# Altium footprint library standard-case.PcbLib: 206 footprints (part 3 of 13)
Each footprint in its own frame and in the unit in brackets; x right, y up, seen from the top. Pads: shape width x height; smd on the part's side, far side on the other; paste and mask are expansions set on the pad; w line width, h text height; cw(c..) or ccw(c..) is an arc to the next point about the centre after c.
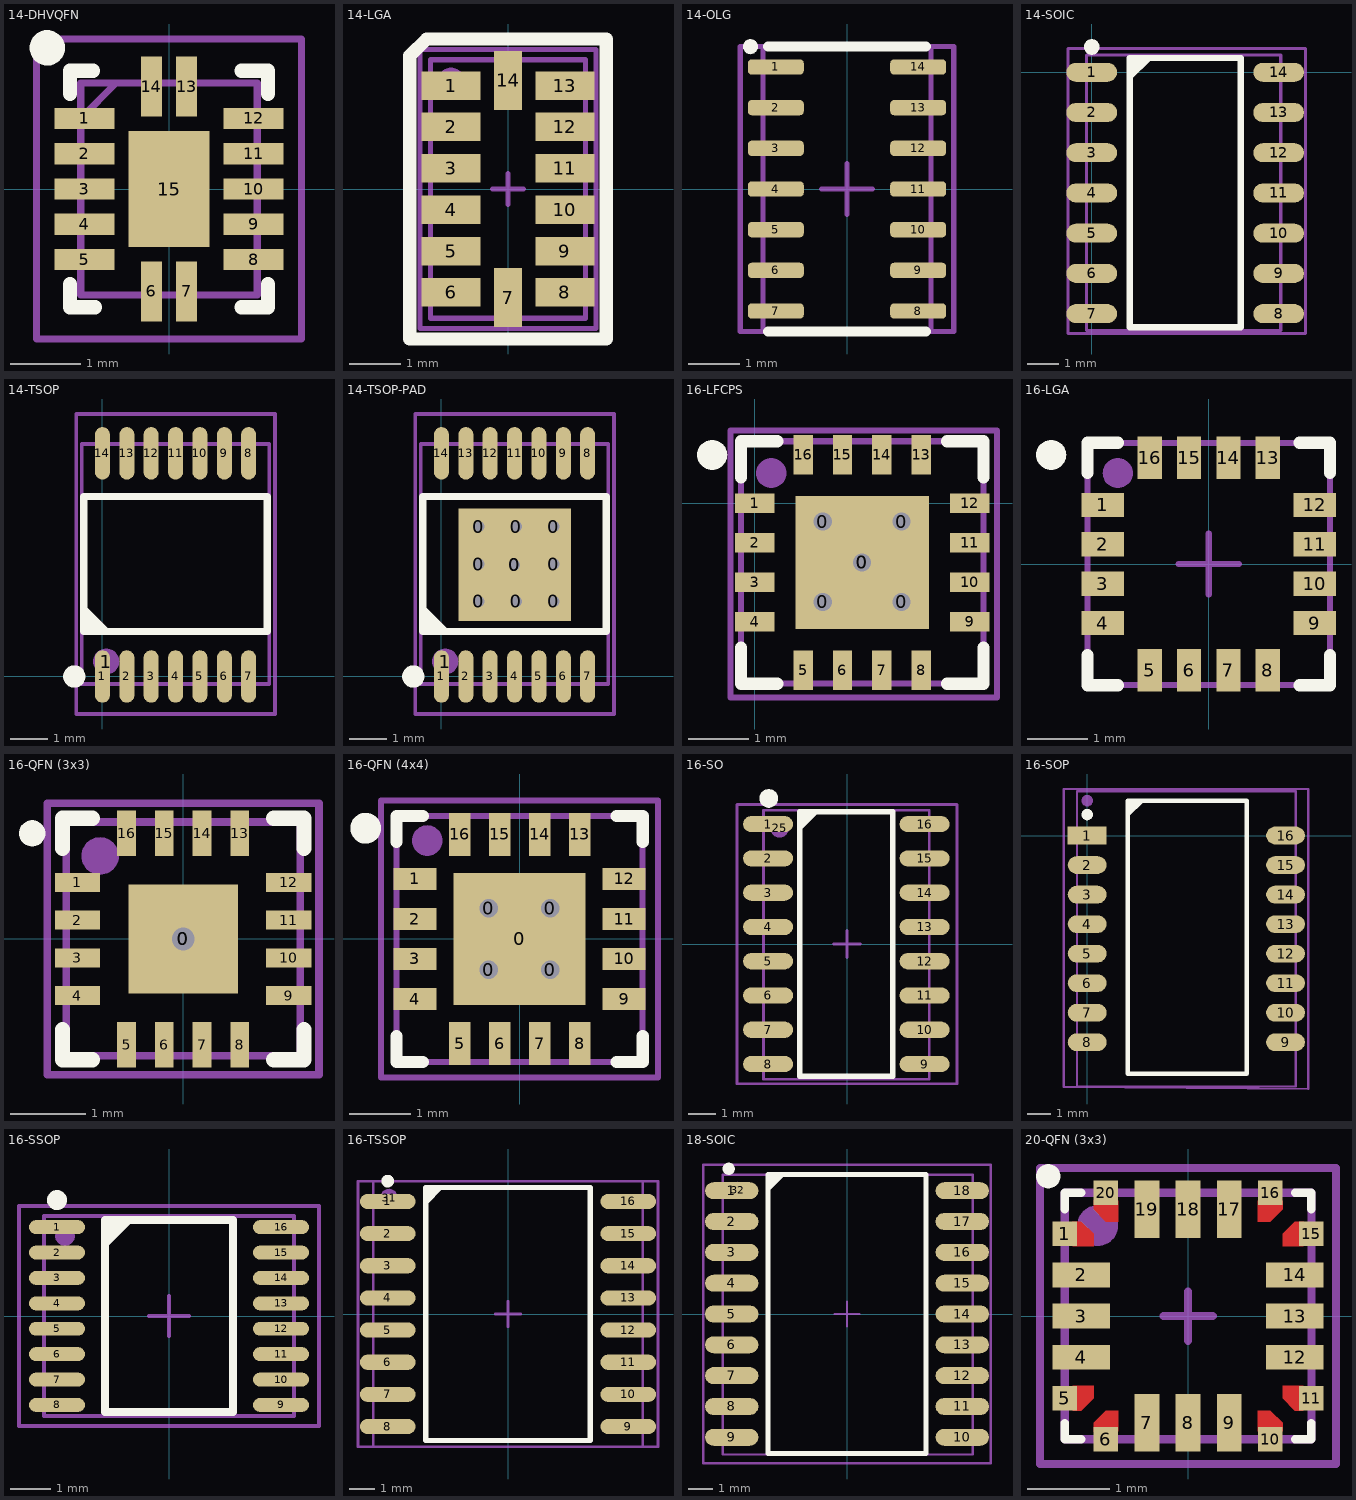
[diagram p2: the footprints below, top view; thin cyan lines are the x and y axes]

## 14-DHVQFN [mm]
pads (15):
  rect 0.85x0.3 smd: 1(-1.2,1) 2(-1.2,0.5) 3(-1.2,0) 4(-1.2,-0.5) 5(-1.2,-1) 8(1.2,-1) 9(1.2,-0.5) 10(1.2,0) 11(1.2,0.5) 12(1.2,1)
  rect 0.3x0.85 smd: 6(-0.25,-1.45) 7(0.25,-1.45) 13(0.25,1.45) 14(-0.25,1.45)
  rect 1.15x1.65 smd: 15(0,0)
Top Overlay:
  circle w0.25: c-1.725,2 r0.125
  lines w0.2: -1.4,-1.675 -1.4,-1.35 ; -1.4,1.35 -1.4,1.675 -1.075,1.675 ; -1.375,-1.675 -1.05,-1.675 ; 1.025,-1.675 1.35,-1.675 ; 1.025,1.675 1.35,1.675 ; 1.4,-1.675 1.4,-1.35 ; 1.4,1.35 1.4,1.675
Mechanical 13:
  lines w0.1: -1.25,1 -0.75,1.5 ; -1.25,-1.5 1.25,-1.5 1.25,1.5 -1.25,1.5 -1.25,-1.5
Mechanical 15:
  lines w0.1: -1.875,-2.125 1.875,-2.125 1.875,2.125 -1.875,2.125 -1.875,-2.125
3D body "74LVC125ABQ,115.stp": height 1, standoff 0, extent -1.3,-1.55 1.3,1.55

## 14-LGA [mm]
height 1
pads (15):
  rect 1.145x0.55 smd: 1(-1.1,2) 2(-1.1,1.2) 3(-1.1,0.4) 4(-1.1,-0.4) 5(-1.1,-1.2) 6(-1.1,-2) 8(1.1,-2) 9(1.1,-1.2) 10(1.1,-0.4) 11(1.1,0.4) 12(1.1,1.2) 13(1.1,2)
  rect 0.55x1.145 smd: 7(0,-2.1) 14(0,2.1)
  round 0.5 on Mech1: ""(-1.1,2.1)
Top Overlay:
  lines w0.254: -1.9,-2.9 1.9,-2.9 1.9,2.9 -1.575,2.9 -1.9,2.575 -1.9,-2.9
Mechanical 1:
  lines w0.1: -1.5,-2.5 1.5,-2.5 1.5,2.5 -1.5,2.5 -1.5,-2.5
Mechanical 15:
  lines w0.1: -0.3,0 0.3,0 ; 0,-0.3 0,0.3 ; -1.7,-2.7 -1.7,2.7 1.7,2.7 1.7,-2.7 -1.7,-2.7
3D body "SW3dPS-LGA-14.STEP": height 1.03, standoff -0.4, extent -1.49,-2.5 1.51,2.5

## 14-OLG [mm]
pads (15):
  rrect50% 1.1x0.3 smd: 1(-1.4,2.4) 2(-1.4,1.6) 3(-1.4,0.8) 4(-1.4,0) 5(-1.4,-0.8) 6(-1.4,-1.6) 7(-1.4,-2.4) 8(1.4,-2.4) 9(1.4,-1.6) 10(1.4,-0.8) 11(1.4,0) 12(1.4,0.8) 13(1.4,1.6) 14(1.4,2.4)
  round 0.3 on Top Overlay: ""(-1.9,2.8)
Top Overlay:
  lines w0.2: -1.55,-2.8 1.55,-2.8 ; -1.55,2.8 1.55,2.8
Mechanical 1:
  lines w0.1: -1.65,-2.8 1.65,-2.8 1.65,2.8 -1.65,2.8 -1.65,-2.8
Mechanical 15:
  lines w0.1: -0.5,0 0.5,0 ; 0,-0.5 0,0.5 ; -2.1,-2.8 2.1,-2.8 2.1,2.8 -2.1,2.8 -2.1,-2.8
3D body "User Library-MAX30101.STEP": height 1.52, standoff -0.03, extent -1.65,-2.8 1.65,2.8

## 14-SOIC [mm] "pitch 1.27 mm"
pads (16):
  rrect100% 1.6x0.6 smd: 1(0,0) 2(0,-1.27) 3(0,-2.54) 4(0,-3.81) 5(0,-5.08) 6(0,-6.35) 7(0,-7.62) 8(5.9,-7.62) 9(5.9,-6.35) 10(5.9,-5.08) 11(5.9,-3.81) 12(5.9,-2.54) 13(5.9,-1.27) 14(5.9,0)
  rrect100% 0.5x0.5 on Top Overlay: ""(0,0.8)
  round 0.5 on Mech1: ""(0.5,0)
Top Overlay:
  region: 1.2,0.45 1.2,-0.27 1.92,0.45
  lines w0.2: 1.2,-8.05 1.2,0.45 4.7,0.45 4.7,-8.05 1.2,-8.05
Mechanical 1:
  lines w0.1: -0.168,-8.15 5.969,-8.15 5.969,0.55 -0.168,0.55 -0.168,-8.15
Mechanical 15:
  lines w0.1: -0.75,-8.25 6.75,-8.25 6.75,0.5 6.75,0.75 -0.75,0.75 -0.75,-8.25
3D body "User Library-so14-2.STEP": height 1.78, standoff 0.01, extent -0.118,-8.15 6.019,0.55

## 14-TSOP [mm]
pads (16):
  rrect100% 0.4x1.4 smd: 1(0,0) 2(0.65,0) 3(1.3,0) 4(1.95,0) 5(2.6,0) 6(3.25,0) 7(3.9,0) 8(3.9,5.95) 9(3.25,5.95) 10(2.6,5.95) 11(1.95,5.95) 12(1.3,5.95) 13(0.65,5.95) 14(0,5.95)
  round 0.7 on Mech1: 1(0.1,0.4)
  round 0.6 on Top Overlay: ""(-0.75,0)
Top Overlay:
  region: -0.5,1.2 0.22,1.2 -0.5,1.92
  lines w0.2: -0.5,1.2 4.4,1.2 4.4,4.8 -0.5,4.8 -0.5,1.2
Mechanical 1:
  lines w0.1: -0.55,6.2 -0.55,6.2 ; -0.55,6.2 4.45,6.2 4.45,-0.2 -0.55,-0.2 -0.55,6.2
Mechanical 15:
  lines w0.1: -0.7,-1 -0.7,7 4.6,7 4.6,2.4 4.6,-1 -0.7,-1
3D body "SW3dPS-TSSOP14-1.STEP": height 1.1, standoff 0, extent -0.55,-0.2 4.45,6.2

## 14-TSOP-PAD [mm] "pitch 0.65 mm, power pad"
pads (26):
  round 0.7 hole 0.3: 0(1,2) 0(1,3) 0(1,4) 0(1.95,2.975) 0(2,2) 0(2,4) 0(3,2) 0(3,3) 0(3,4)
  rect 3x3 smd: 0(1.95,2.975)
  rrect100% 0.4x1.4 smd: 1(0,0) 2(0.65,0) 3(1.3,0) 4(1.95,0) 5(2.6,0) 6(3.25,0) 7(3.9,0) 8(3.9,5.95) 9(3.25,5.95) 10(2.6,5.95) 11(1.95,5.95) 12(1.3,5.95) 13(0.65,5.95) 14(0,5.95)
  round 0.7 on Mech1: 1(0.1,0.4)
  round 0.6 on Top Overlay: ""(-0.75,0)
Top Overlay:
  region: -0.5,1.2 0.22,1.2 -0.5,1.92
  lines w0.2: -0.5,1.2 4.4,1.2 4.4,4.8 -0.5,4.8 -0.5,1.2
Mechanical 1:
  lines w0.1: -0.55,6.2 -0.55,6.2 ; -0.55,6.2 4.45,6.2 4.45,-0.2 -0.55,-0.2 -0.55,6.2
Mechanical 15:
  lines w0.1: -0.7,-1 -0.7,7 4.6,7 4.6,2.4 4.6,-1 -0.7,-1
3D body "SW3dPS-TSSOP14-1.STEP": height 1.1, standoff 0, extent -0.55,-0.2 4.45,6.2

## 16-LFCPS [mm] "4x4 mm, pitch 0.65 mm"
height 0.9
pads (24):
  round 0.7 hole 0.3: 0(1.125,-1.625) 0(1.125,-0.3) 0(1.775,-0.975) 0(2.425,-1.625) 0(2.425,-0.3)
  rect 2.2x2.2 smd: 0(1.775,-0.975)
  rect 0.65x0.32 smd: 1(0,0) 2(0,-0.65) 3(0,-1.3) 4(0,-1.95) 9(3.55,-1.95) 10(3.55,-1.3) 11(3.55,-0.65) 12(3.55,0)
  rect 0.32x0.65 smd: 5(0.8,-2.75) 6(1.45,-2.75) 7(2.1,-2.75) 8(2.75,-2.75) 13(2.75,0.8) 14(2.1,0.8) 15(1.45,0.8) 16(0.8,0.8)
  round 0.5 on Top Overlay: ""(-0.7,0.8)
  round 0.5 on Mech1: ""(0.275,0.5)
Top Overlay:
  lines w0.2: -0.225,-2.375 -0.225,-2.975 0.375,-2.975 ; -0.225,0.425 -0.225,1.025 0.375,1.025 ; 3.175,-2.975 3.775,-2.975 3.775,-2.375 ; 3.175,1.025 3.775,1.025 3.775,0.425
Mechanical 1:
  lines w0.1: -0.225,-2.975 -0.225,1.025 3.775,1.025 3.775,-2.975 -0.225,-2.975
Mechanical 15:
  lines w0.1: -0.4,-3.2 4,-3.2 4,1.2 -0.4,1.2 -0.4,-3.2
3D body "User Library-qfn16-4x4No pad.STEP": height 0.92, standoff 0, extent -0.225,-2.975 3.775,1.025

## 16-LGA [mm] "4x4 mm, pitch 0.65 mm"
height 1
pads (18):
  rect 0.7x0.4 smd: 1(-1.75,0.975) 2(-1.75,0.325) 3(-1.75,-0.325) 4(-1.75,-0.975) 9(1.75,-0.975) 10(1.75,-0.325) 11(1.75,0.325) 12(1.75,0.975)
  rect 0.4x0.7 smd: 5(-0.975,-1.75) 6(-0.325,-1.75) 7(0.325,-1.75) 8(0.975,-1.75) 13(0.975,1.75) 14(0.325,1.75) 15(-0.325,1.75) 16(-0.975,1.75)
  round 0.5 on Top Overlay: ""(-2.6,1.8)
  round 0.5 on Mech1: ""(-1.5,1.5)
Top Overlay:
  lines w0.2: -2,-1.5 -2,-2 -1.5,-2 ; -2,1.5 -2,2 -1.5,2 ; 1.5,-2 2,-2 2,-1.5 ; 1.5,2 2,2 2,1.5
Mechanical 1:
  lines w0.1: -2,-2 -2,2 2,2 2,-2 -2,-2
Mechanical 15:
  lines w0.1: -0.5,0 0.5,0 ; 0,-0.5 0,0.5 ; -2,-2 -2,2 2,2 2,-2 -2,-2
3D body "User Library-LGA-16.step": height 0.98, standoff 0, extent -2,-2 2,2

## 16-QFN (3x3) [mm] "3x3 mm, pitch 0.5 mm"
height 0.75
pads (20):
  rect 1.45x1.45 smd: 0(0,0)
  round 0.7 hole 0.3: 0(0,0)
  rect 0.6x0.25 smd: 1(-1.4,0.75) 2(-1.4,0.25) 3(-1.4,-0.25) 4(-1.4,-0.75) 9(1.4,-0.75) 10(1.4,-0.25) 11(1.4,0.25) 12(1.4,0.75)
  rect 0.25x0.6 smd: 5(-0.75,-1.4) 6(-0.25,-1.4) 7(0.25,-1.4) 8(0.75,-1.4) 13(0.75,1.4) 14(0.25,1.4) 15(-0.25,1.4) 16(-0.75,1.4)
  round 0.35 on Top Overlay: ""(-2,1.4)
  round 0.5 on Mech1: ""(-1.1,1.1)
Top Overlay:
  lines w0.2: -1.6,-1.2 -1.6,-1.6 -1.2,-1.6 ; -1.6,1.2 -1.6,1.6 -1.2,1.6 ; 1.2,-1.6 1.6,-1.6 1.6,-1.2 ; 1.2,1.6 1.6,1.6 1.6,1.2
Mechanical 1:
  lines w0.1: -1.55,-1.55 -1.55,1.55 1.55,1.55 1.55,-1.55 -1.55,-1.55
Mechanical 15:
  lines w0.1: -0.2,0 0.2,0 ; 0,-0.2 0,0.2 ; -1.8,-1.8 1.8,-1.8 1.8,1.8 -1.8,1.8 -1.8,-1.8
3D body "User Library-QFN-16.STEP": height 0.9, standoff 0, extent -1.501,-1.501 1.501,1.501

## 16-QFN (4x4) [mm] "4x4 mm, pitch 0.65 mm"
height 0.75
pads (22):
  round 0.7 hole 0.3: 0(-0.5,-0.5) 0(-0.5,0.5) 0(0.5,-0.5) 0(0.5,0.5)
  rect 2.15x2.15 smd: 0(0,0)
  rect 0.7x0.35 smd: 1(-1.7,0.975) 2(-1.7,0.325) 3(-1.7,-0.325) 4(-1.7,-0.975) 9(1.7,-0.975) 10(1.7,-0.325) 11(1.7,0.325) 12(1.7,0.975)
  rect 0.35x0.7 smd: 5(-0.975,-1.7) 6(-0.325,-1.7) 7(0.325,-1.7) 8(0.975,-1.7) 13(0.975,1.7) 14(0.325,1.7) 15(-0.325,1.7) 16(-0.975,1.7)
  round 0.5 on Mech1: ""(-1.5,1.6)
Top Overlay:
  circle w0.25: c-2.5,1.8 r0.125
  lines w0.2: -2,-1.575 -2,-2 -1.575,-2 ; -2,1.575 -2,2 -1.575,2 ; 1.575,-2 2,-2 2,-1.575 ; 1.575,2 2,2 2,1.575
Mechanical 1:
  lines w0.1: -2,-2 -2,2 2,2 2,-2 -2,-2
Mechanical 15:
  lines w0.1: -0.5,0 0.5,0 ; 0,-0.5 0,0.5 ; -2.25,-2.25 -2.25,2.25 2.25,2.25 2.25,-2.25 -2.25,-2.25
3D body "16-QFN (4x4).step": height 0.75, standoff 0, extent -2,-2 2,2

## 16-SO [mm] "pitch 1.27 mm"
height 2.65
pads (18):
  oval 1.85x0.6 smd: 1(-2.925,4.448) 2(-2.925,3.178) 3(-2.925,1.908) 4(-2.925,0.638) 5(-2.925,-0.632) 6(-2.925,-1.902) 7(-2.925,-3.172) 8(-2.925,-4.442) 9(2.875,-4.442) 10(2.875,-3.172) 11(2.875,-1.902) 12(2.875,-0.632) 13(2.875,0.638) 14(2.875,1.908) 15(2.875,3.178) 16(2.875,4.448)
  round 0.7 on Mech1: 25(-2.5,4.3)
  round 0.7 on Top Overlay: ""(-2.9,5.4)
Top Overlay:
  region: -1.75,4.9 -1.75,4.18 -1.03,4.9
  lines w0.2: -1.75,-4.9 -1.75,4.9 1.7,4.9 1.7,-4.9 -1.75,-4.9
Mechanical 1:
  lines w0.1: -3.093,-5.01 -3.093,4.96 3.044,4.96 3.044,-5.01 -3.093,-5.01
Mechanical 15:
  lines w0.1: -0.499,0.003 0.501,0.003 ; 0.001,-0.497 0.001,0.503 ; -4.075,-5.175 -4.075,5.175 4.075,5.175 4.075,-5.175 -4.075,-5.175
3D body "User Library-so16-1.STEP": height 1.73, standoff -0.04, extent -3.093,-5.01 3.044,4.96

## 16-SOP [mm] "pitch 1.27 mm"
pads (18):
  rect 1.67x0.76 smd: 1(0,0)
  oval 1.67x0.76 smd: 2(0,-1.27) 3(0,-2.54) 4(0,-3.81) 5(0,-5.08) 6(0,-6.35) 7(0,-7.62) 8(0,-8.89) 9(8.53,-8.89) 10(8.53,-7.62) 11(8.53,-6.35) 12(8.53,-5.08) 13(8.53,-3.81) 14(8.53,-2.54) 15(8.53,-1.27) 16(8.53,0)
  round 0.5 on Top Overlay: ""(0,0.9)
  round 0.5 on Mech1: ""(0,1.5)
Top Overlay:
  region: 1.75,1.5 1.75,0.78 2.47,1.5
  lines w0.2: 4.583,1.5 6.86,1.5 6.86,-10.25 1.75,-10.25 1.75,1.5 6,1.5
Mechanical 1:
  lines w0.1: -0.435,-10.795 8.965,-10.795 8.965,1.905 -0.435,1.905 -0.435,-10.795
Mechanical 15:
  lines w0.1: -1,-10.8 9.5,-10.9 9.5,2 -1,2 -1,-10.8
3D body "User Library-smt4.step": height 5.1, standoff 0, extent -0.435,-10.795 8.965,1.905

## 16-SSOP [mm] "pitch 0.635 mm"
height 1.75
pads (17):
  oval 1.4x0.35 smd: 1(-2.8,2.222) 2(-2.8,1.587) 3(-2.8,0.953) 4(-2.8,0.318) 5(-2.8,-0.318) 6(-2.8,-0.953) 7(-2.8,-1.587) 8(-2.8,-2.222) 9(2.8,-2.222) 10(2.8,-1.587) 11(2.8,-0.953) 12(2.8,-0.318) 13(2.8,0.318) 14(2.8,0.953) 15(2.8,1.587) 16(2.8,2.222)
  round 0.5 on Mech1: ""(-2.6,2)
Top Overlay:
  circle w0.25: c-2.8,2.9 r0.125
  region: -1.6,2.4 -1.6,1.68 -0.88,2.4
  lines w0.2: -1.6,-2.4 -1.6,2.4 1.6,2.4 1.6,-2.4 -1.6,-2.4
Mechanical 1:
  lines w0.1: -3.127,-2.5 -3.127,2.5 3.126,2.5 3.126,-2.5 -3.127,-2.5
Mechanical 15:
  lines w0.1: -0.5,0 0.5,0 ; 0,-0.5 0,0.5 ; -3.75,-2.75 -3.75,2.75 3.75,2.75 3.75,-2.75 -3.75,-2.75
3D body "ssop16.step": height 1.73, standoff -0.01, extent -3.127,-2.5 3.126,2.5

## 16-TSSOP [mm] "pitch 1.27 mm"
height 2.65
pads (17):
  oval 2.2x0.6 smd: 1(-4.75,4.445) 2(-4.75,3.175) 3(-4.75,1.905) 4(-4.75,0.635) 5(-4.75,-0.635) 6(-4.75,-1.905) 7(-4.75,-3.175) 8(-4.75,-4.445) 9(4.75,-4.445) 10(4.75,-3.175) 11(4.75,-1.905) 12(4.75,-0.635) 13(4.75,0.635) 14(4.75,1.905) 15(4.75,3.175) 16(4.75,4.445)
  round 0.7 on Mech1: 31(-4.7,4.6)
Top Overlay:
  circle w0.25: c-4.75,5.25 r0.125
  region: -3.25,5 -3.25,4.28 -2.53,5
  lines w0.2: -3.25,-5 -3.25,5 3.25,5 3.25,-5 -3.25,-5
Mechanical 1:
  lines w0.1: -5.315,-5.25 5.315,-5.25 5.315,5.25 -5.315,5.25 -5.315,-5.25
Mechanical 15:
  lines w0.1: -0.5,0 0.5,0 ; 0,-0.5 0,0.5 ; -5.925,-5.25 5.925,-5.25 5.925,5.25 -5.925,5.25 -5.925,-5.25
3D body "User Library-SOIC16_Wide_JEDEC_MS-013AA.STEP": height 2.62, standoff -0.03, extent -5.315,-5.25 5.315,5.25

## 18-SOIC [mm] "pitch 1.27 mm"
height 2.65
pads (19):
  oval 2.2x0.7 smd: 1(-4.75,5.08) 2(-4.75,3.81) 3(-4.75,2.54) 4(-4.75,1.27) 5(-4.75,0) 6(-4.75,-1.27) 7(-4.75,-2.54) 8(-4.75,-3.81) 9(-4.75,-5.08) 10(4.75,-5.08) 11(4.75,-3.81) 12(4.75,-2.54) 13(4.75,-1.27) 14(4.75,0) 15(4.75,1.27) 16(4.75,2.54) 17(4.75,3.81) 18(4.75,5.08)
  round 0.7 on Mech1: 32(-4.5,5.1)
Top Overlay:
  region: -3.25,5.75 -3.25,5.03 -2.53,5.75
  lines w0.2: -3.25,-5.75 -3.25,5.75 3.25,5.75 3.25,-5.75 -3.25,-5.75
  lines w0.25: -4.75,6 ccw(c-4.874,5.983) -4.749,5.983
Mechanical 1:
  lines w0.1: -5.125,-5.79 -5.125,5.74 5.175,5.74 5.175,-5.79 -5.125,-5.79
Mechanical 15:
  lines w0.1: -0.5,0 0.5,0 ; 0,-0.5 0,0.5 ; -5.925,-6.15 -5.925,6.15 5.925,6.15 5.925,-6.15 -5.925,-6.15
3D body "SW3dPS-SOIC18-300.STEP": height 2.65, standoff 0, extent -5.125,-5.79 5.175,5.74

## 20-QFN (3x3) [mm] "3x3 mm, pitch 0.5 mm"
pads (22):
  rect 0.3x0.3 smd: 1(-1.5,1) 5(-1.5,-1) 6(-1,-1.5) 10(1,-1.5) 11(1.5,-1) 15(1.5,1) 16(1,1.5) 20(-1,1.5)
  rect 0.7x0.3 smd: 2(-1.3,0.5) 3(-1.3,0) 4(-1.3,-0.5) 12(1.3,-0.5) 13(1.3,0) 14(1.3,0.5)
  rect 0.3x0.7 smd: 7(-0.5,-1.3) 8(0,-1.3) 9(0.5,-1.3) 17(0.5,1.3) 18(0,1.3) 19(-0.5,1.3)
  round 0.3 on Top Overlay: ""(-1.7,1.7)
  round 0.5 on Mech1: ""(-1.1,1.1)
Top Layer:
  region: -1.4,1.15 -1.3,1.15 -1.15,1 -1.15,0.85 -1.4,0.85
  region: -1.15,1.4 -1.15,1.3 -1,1.15 -0.85,1.15 -0.85,1.4
  region: 1.4,1.15 1.3,1.15 1.15,1 1.15,0.85 1.4,0.85
  region: 1.15,1.4 1.15,1.3 1,1.15 0.85,1.15 0.85,1.4
  region: -1.4,-1.15 -1.3,-1.15 -1.15,-1 -1.15,-0.85 -1.4,-0.85
  region: -1.15,-1.4 -1.15,-1.3 -1,-1.15 -0.85,-1.15 -0.85,-1.4
  region: 1.15,-1.4 1.15,-1.3 1,-1.15 0.85,-1.15 0.85,-1.4
  region: 1.4,-1.15 1.3,-1.15 1.15,-1 1.15,-0.85 1.4,-0.85
Top Overlay:
  lines w0.1: -1.5,-1.3 -1.5,-1.5 -1.3,-1.5 ; -1.5,1.3 -1.5,1.5 -1.3,1.5 ; 1.3,-1.5 1.5,-1.5 1.5,-1.3 ; 1.3,1.5 1.5,1.5 1.5,1.3
Top Solder:
  region: 0.75,-0.85 0.85,-0.85 0.85,-0.75 1.25,-0.75 1.25,-1.25 0.75,-1.25
  region: -0.75,-0.85 -0.85,-0.85 -0.85,-0.75 -1.25,-0.75 -1.25,-1.25 -0.75,-1.25
  region: -0.75,0.85 -0.85,0.85 -0.85,0.75 -1.25,0.75 -1.25,1.25 -0.75,1.25
  region: 0.75,0.85 0.85,0.85 0.85,0.75 1.25,0.75 1.25,1.25 0.75,1.25
Mechanical 1:
  lines w0.1: -1.5,-1.5 -1.5,1.5 1.5,1.5 1.5,-1.5 -1.5,-1.5
Mechanical 15:
  lines w0.1: -0.3,0 0.3,0 ; 0,-0.3 0,0.3 ; -1.8,-1.8 -1.8,1.8 1.8,1.8 1.8,-1.8 -1.8,-1.8
3D body "User Library-UFQFPN20-1.STEP": height 0.55, standoff 0, extent -1.5,-1.5 1.5,1.5